# EAGLE library part LM517701DCPR (library LM517701DCPR)
Switching Controllers 78V wide-VIN bidirec tional 4-switch buc Source: Datasheet <https://www.ti.com/lit/ds/symlink/lm51770.pdf?ts=1773625559046>
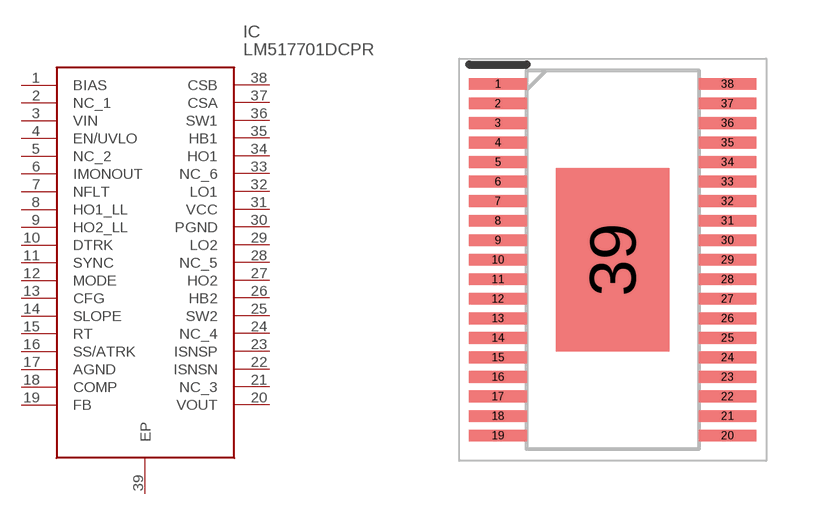
[diagram p0: symbol with the pads of SOP50P640X120-39N; footprint SOP50P640X120-39N]

Designator prefix IC

## LM517701DCPR (Description: Switching Controllers 78V wide-VIN bidirec tional 4-switch buc; Height: 1.2mm; Manufacturer_Name: Texas Instruments; Manufacturer_Part_Number: LM517701DCPR)  [SOP50P640X120-39N]
1  BIAS
2  NC_1
3  VIN
4  EN/UVLO
5  NC_2
6  IMONOUT
7  NFLT
8  HO1_LL
9  HO2_LL
10  DTRK
11  SYNC
12  MODE
13  CFG
14  SLOPE
15  RT
16  SS/ATRK
17  AGND
18  COMP
19  FB
20  VOUT
21  NC_3
22  ISNSN
23  ISNSP
24  NC_4
25  SW2
26  HB2
27  HO2
28  NC_5
29  LO2
30  PGND
31  VCC
32  LO1
33  NC_6
34  HO1
35  HB1
36  SW1
37  CSA
38  CSB
39  EP

## Footprint SOP50P640X120-39N (pad centres in mm)
DCP0038A
smd 1.475 x 0.3: 1 -2.938,4.5; 2 -2.938,4; 3 -2.938,3.5; 4 -2.938,3; 5 -2.938,2.5; 6 -2.938,2; 7 -2.938,1.5; 8 -2.938,1; 9 -2.938,0.5; 10 -2.938,0; 11 -2.938,-0.5; 12 -2.938,-1; 13 -2.938,-1.5; 14 -2.938,-2; 15 -2.938,-2.5; 16 -2.938,-3; 17 -2.938,-3.5; 18 -2.938,-4; 19 -2.938,-4.5; 20 2.938,-4.5; 21 2.938,-4; 22 2.938,-3.5; 23 2.938,-3; 24 2.938,-2.5; 25 2.938,-2; 26 2.938,-1.5; 27 2.938,-1; 28 2.938,-0.5; 29 2.938,0; 30 2.938,0.5; 31 2.938,1; 32 2.938,1.5; 33 2.938,2; 34 2.938,2.5; 35 2.938,3; 36 2.938,3.5; 37 2.938,4; 38 2.938,4.5
smd 2.9 x 4.7: 39 0,0